# Altium footprint library CustomCase.PcbLib: 411 footprints (part 10 of 26)
Each footprint in its own frame and in the unit in brackets; x right, y up, seen from the top. Pads: shape width x height; smd on the part's side, far side on the other; paste and mask are expansions set on the pad; w line width, h text height; cw(c..) or ccw(c..) is an arc to the next point about the centre after c.
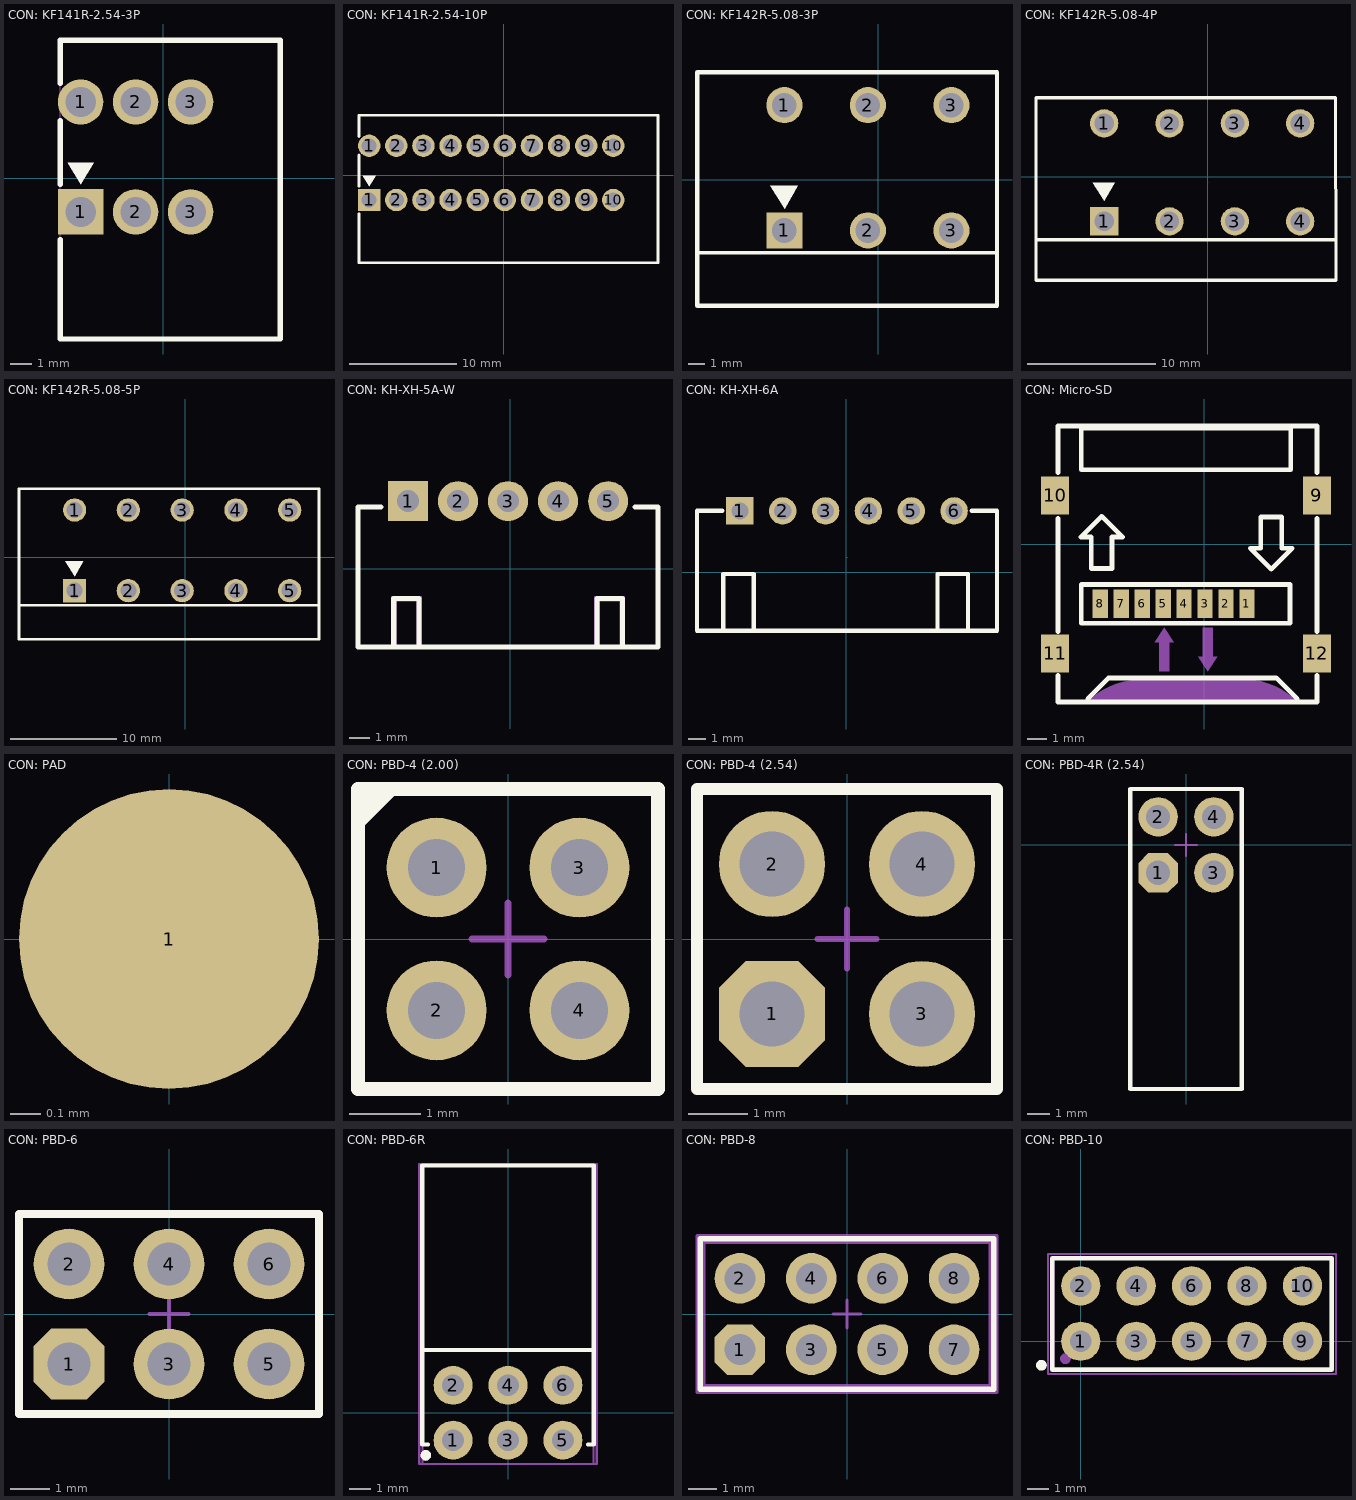
[diagram p9: the footprints below, top view; thin cyan lines are the x and y axes]

## CON: KF141R-2.54-3P [mm]
pads (6):
  rect 2.1x2.1 hole 1.4: 1(-3.816,-1.566)
  round 2.1 hole 1.4: 1(-3.816,3.514) 2(-1.276,-1.566) 2(-1.276,3.514) 3(1.264,-1.566) 3(1.264,3.514)
Top Overlay:
  region: -3.816,-0.296 -3.216,0.704 -4.416,0.704
  lines w0.254: -4.766,-2.848 -4.766,-7.436 5.394,-7.436 5.394,6.364 -4.766,6.364 -4.766,4.372 ; -4.766,-0.285 -4.766,2.655
Size Area:
  region: -3.566,3.164 -4.066,3.164 -4.066,3.864 -3.566,3.864
  region: -1.026,3.164 -1.526,3.164 -1.526,3.864 -1.026,3.864
  region: -1.026,-1.916 -1.526,-1.916 -1.526,-1.216 -1.026,-1.216
  region: -3.566,-1.216 -3.566,-1.916 -4.066,-1.916 -4.066,-1.216
  region: 1.514,-1.916 1.014,-1.916 1.014,-1.216 1.514,-1.216
  region: 1.514,3.164 1.014,3.164 1.014,3.864 1.514,3.864
  region: -4.706,6.364 -4.706,6.388 -4.741,6.424 -4.791,6.424 -4.826,6.388 -4.826,6.364 -4.826,6.339 -4.791,6.304 -4.741,6.304 -4.706,6.339
  lines w0.051: -4.766,-7.436 5.394,-7.436 5.394,6.364 -4.766,6.364 -4.766,-7.436
3D body "User Library-DG141R-3-2_54.step": height 12.66, standoff -3.44, extent -4.616,-7.096 5.444,6.504

## CON: KF141R-2.54-10P [mm]
pads (20):
  rect 2.1x2.1 hole 1.4 paste-2539.97 mask+0.051: 1(-12.589,-2.339)
  round 2.1 hole 1.4 paste-2539.97 mask+0.051: 1(-12.589,2.741) 2(-10.049,-2.339) 2(-10.049,2.741) 3(-7.509,-2.339) 3(-7.509,2.741) 4(-4.969,-2.339) 4(-4.969,2.741) 5(-2.429,-2.339) 5(-2.429,2.741) 6(0.111,-2.339) 6(0.111,2.741) 7(2.651,-2.339) 7(2.651,2.741) 8(5.191,-2.339) 8(5.191,2.741) 9(7.731,-2.339) 9(7.731,2.741) 10(10.271,-2.339) 10(10.271,2.741)
Top Overlay:
  region: -12.589,-1.069 -11.989,-0.069 -13.189,-0.069
  lines w0.254: -13.539,-3.62 -13.539,-8.209 14.461,-8.209 14.461,5.591 -13.539,5.591 -13.539,3.599 ; -13.539,-1.058 -13.539,1.883
Size Area:
  lines w0.003: 0.461,-0.861 0.461,-0.86
3D body "User Library-DG141R-5-2_54.step": height 12.66, standoff -3.44, extent -13.39,-7.85 1.75,5.75
3D body "User Library-DG141R-5-2_54.step": height 12.66, standoff -3.44, extent -0.69,-7.875 14.45,5.725

## CON: KF142R-5.08-3P [mm]
pads (6):
  rect 2.2x2.2 hole 1.5: 1(-5.711,-3.094)
  round 2.2 hole 1.5: 1(-5.711,4.526) 2(-0.631,-3.094) 2(-0.631,4.526) 3(4.449,-3.094) 3(4.449,4.526)
Top Overlay:
  region: -5.681,-1.784 -4.881,-0.384 -6.581,-0.384
  lines w0.2: -11.025,-4.45 7.225,-4.45
  lines w0.254: -11.011,-7.674 7.225,-7.674 7.225,6.526 -11.011,6.526 -11.011,-7.674
Size Area:
  lines w0.003: -0.04,-0.082 -0.039,-0.081
3D body: height 10.2, standoff 0, extent -10.975,-7.675 7.225,6.525

## CON: KF142R-5.08-4P [mm]
pads (8):
  rect 2.2x2.2 hole 1.5: 1(-8.041,-3.47)
  round 2.2 hole 1.5: 1(-8.041,4.15) 2(-2.961,-3.47) 2(-2.961,4.15) 3(2.119,-3.47) 3(2.119,4.15) 4(7.199,-3.47) 4(7.199,4.15)
Top Overlay:
  region: -8.021,-1.86 -7.221,-0.46 -8.921,-0.46
  lines w0.254: -13.325,-4.9 9.954,-4.9 ; 9.954,6.14 9.984,-8.06 ; 9.954,6.15 -13.341,6.15 -13.341,-8.05 9.984,-8.05
Size Area:
  lines w0.003: 0.17,-0.463 0.171,-0.463
3D body "DG142R-4-5.08.stp": height 13.4, standoff -3.5, extent -13.052,-8.043 9.708,6.057

## CON: KF142R-5.08-5P [mm]
pads (10):
  rect 2.2x2.2 hole 1.5: 1(-10.475,-3.165)
  round 2.2 hole 1.5: 1(-10.475,4.455) 2(-5.395,-3.165) 2(-5.395,4.455) 3(-0.315,-3.165) 3(-0.315,4.455) 4(4.765,-3.165) 4(4.765,4.455) 5(9.845,-3.165) 5(9.845,4.455)
Top Overlay:
  region: -10.445,-1.785 -9.645,-0.385 -11.345,-0.385
  lines w0.254: -15.725,-4.549 12.6,-4.549 ; -15.725,-7.745 -15.725,6.455 12.615,6.455 12.615,-7.745 -15.725,-7.745
Size Area:
  lines w0.003: 0.276,-0.153 0.277,-0.152
3D body "Terminal DG142R-5-5.08.stp": height 13.4, standoff -3.5, extent -15.475,-7.695 12.365,6.405

## CON: KH-XH-5A-W [mm]
pads (5):
  rect 2x2 hole 1.1: 1(-5.122,3.369)
  round 2 hole 1.1: 2(-2.622,3.369) 3(-0.122,3.369) 4(2.378,3.369) 5(4.878,3.369)
Top Overlay:
  lines w0.254: -7.622,-3.916 -7.622,3.084 -6.472,3.084 ; -7.621,-3.916 7.372,-3.916 ; 6.228,3.084 7.371,3.084 7.371,-3.916 ; -5.837,-3.916 -4.567,-3.916 -4.567,-1.503 -5.837,-1.503 -5.837,-3.916 ; 4.323,-3.916 5.593,-3.916 5.593,-1.503 4.323,-1.503 4.323,-3.916
Size Area:
  region: 4.196,-3.916 4.196,-1.376 5.72,-1.376 5.72,-3.916 5.466,-3.916 5.466,-1.63 4.45,-1.63 4.45,-3.916
  region: -5.964,-3.916 -5.964,-1.376 -4.44,-1.376 -4.44,-3.916 -4.694,-3.916 -4.694,-1.63 -5.71,-1.63 -5.71,-3.916
3D body "CWF-5R.step": height 5.75, standoff -3.5, extent -7.625,-3.916 7.375,3.704

## CON: KH-XH-6A [mm]
pads (6):
  rect 1.6x1.6 hole 1: 1(-6.214,3.586)
  round 1.6 hole 1: 2(-3.714,3.586) 3(-1.214,3.586) 4(1.286,3.586) 5(3.786,3.586) 6(6.286,3.586)
Top Overlay:
  lines w0.254: -7.245,3.586 -8.714,3.586 -8.714,-3.414 8.786,-3.414 8.786,3.586 7.317,3.586 ; -7.183,-3.399 -7.183,-0.097 -5.405,-0.097 -5.405,-3.399 -7.183,-3.399 ; 5.317,-3.399 5.317,-0.097 7.095,-0.097 7.095,-3.399 5.317,-3.399
Size Area:
  lines w0.003: 0.036,0.879 0.036,0.88
3D body "User Library-JST-XH-2_5mm-6.step": height 5.95, standoff -3.35, extent -8.775,-3.7 8.725,3.94

## CON: Micro-SD [mm]
pads (12):
  rect 0.8x1.5 smd paste+0 mask+0.051: 1(2.25,-3.142) 2(1.15,-3.142) 3(0.05,-3.142) 4(-1.05,-3.142) 5(-2.15,-3.142) 6(-3.25,-3.142) 7(-4.35,-3.142) 8(-5.45,-3.142)
  rect 1.45x2 smd paste+0 mask+0.051: 9(5.93,2.558) 10(-7.83,2.558) 11(-7.83,-5.742) 12(5.93,-5.742)
Top Overlay:
  lines w0.254: -7.681,-6.892 -7.681,-8.292 5.941,-8.292 ; -7.681,-4.592 -7.681,1.358 ; -7.681,3.758 -7.681,6.195 ; -7.681,6.205 5.941,6.205 5.941,3.758 ; -7.659,-8.292 5.941,-8.292 ; -6.112,-8.254 -6.112,-8.124 -5.012,-7.024 3.788,-7.024 4.888,-8.124 4.888,-8.254 ; 5.941,-6.892 5.941,-8.292 ; 5.941,-4.592 5.941,1.358 ; -6.481,0.367 -5.93,0.367 -5.93,-1.284 -4.83,-1.284 -4.83,0.367 -4.281,0.367 -4.83,0.918 -5.381,1.467 -5.93,0.918 -6.481,0.367 ; -6.45,-4.154 4.512,-4.154 4.512,-2.122 -6.45,-2.122 -6.45,-4.154 ; -6.45,3.905 4.55,3.905 4.55,6.105 -6.45,6.105 -6.45,3.905 ; 2.43,-0.22 2.978,-0.771 3.529,-1.32 4.078,-0.771 4.629,-0.22 4.078,-0.22 4.078,1.431 2.978,1.431 2.978,-0.22 2.43,-0.22
Size Area:
  region: -6.12,-8.292 -5.978,-8.151 -5.67,-7.898 -5.338,-7.676 -4.986,-7.488 -4.617,-7.335 -4.235,-7.219 -3.844,-7.141 -3.446,-7.102 -3.247,-7.102 1.914,-7.102 2.117,-7.094 2.522,-7.12 2.922,-7.187 3.314,-7.295 3.692,-7.443 4.053,-7.63 4.392,-7.852 4.707,-8.108 4.85,-8.252
  region: -2.093,-4.386 -2.601,-5.148 -2.347,-5.148 -2.347,-6.672 -1.839,-6.672 -1.839,-5.148 -1.585,-5.148
  region: 0.193,-6.672 0.701,-5.91 0.447,-5.91 0.447,-4.386 -0.061,-4.386 -0.061,-5.91 -0.315,-5.91
3D body "472192001.stp": height 1.9, standoff 0, extent -8.271,-7.107 6.329,6.193

## CON: PAD [mm]
pads (1):
  round 1 smd paste+0 mask+0: 1(0,0)

## CON: PBD-4 (2.00) [mm] "PBD-4"
height 10
pads (4):
  round 1.4 hole 0.8: 1(-1,1) 2(-1,-1) 3(1,1) 4(1,-1)
Top Overlay:
  region: -2.1,1.5 -1.5,2.1 -2.1,2.1
  lines w0.2: -2.1,-2.1 2.1,-2.1 2.1,2.1 -2.1,2.1 -2.1,-2.1
Top Assy:
  lines w0.1: -2.1,-2.1 2.1,-2.1 2.1,2.1 -2.1,2.1 -2.1,-2.1
Size Area:
  lines w0.1: -0.5,0 0.5,0 ; 0,-0.5 0,0.5 ; -2.1,-2.1 2.1,-2.1 2.1,2.1 -2.1,2.1 -2.1,-2.1
3D body "791077001-1.STEP": height 4.22, standoff -3.22, extent -2.095,-2.095 2.095,2.095

## CON: PBD-4 (2.54) [mm] "PBD-4"
height 10
pads (4):
  oct 1.8x1.8 hole 1.1: 1(-1.27,-1.27)
  round 1.8 hole 1.1: 2(-1.27,1.27) 3(1.27,-1.27) 4(1.27,1.27)
Top Overlay:
  lines w0.2: -2.54,-2.54 -2.54,2.54 2.54,2.54 2.54,-2.54 -2.54,-2.54
Top Assy:
  lines w0.1: -2.54,-2.54 -2.54,2.54 2.54,2.54 2.54,-2.54 -2.54,-2.54
Size Area:
  lines w0.1: -0.5,0 0.5,0 ; 0,-0.5 0,0.5 ; -2.54,-2.54 -2.54,2.54 2.54,2.54 2.54,-2.54 -2.54,-2.54
3D body "User Library-PBD-4R.STEP": height 8.53, standoff -0.57, extent -2.54,-2.54 2.54,2.54

## CON: PBD-4R (2.54) [mm] "PBD-4"
height 10
pads (4):
  oct 1.8x1.8 hole 1.1: 1(-1.27,-1.27)
  round 1.8 hole 1.1: 2(-1.27,1.27) 3(1.27,-1.27) 4(1.27,1.27)
Top Overlay:
  lines w0.2: -2.54,-11.1 2.54,-11.1 2.54,2.54 -2.54,2.54 -2.54,-11.1
Top Assy:
  lines w0.1: -2.54,-11.1 2.54,-11.1 2.54,2.54 -2.54,2.54 -2.54,-11.1
Size Area:
  lines w0.1: -0.5,0 0.5,0 ; 0,-0.5 0,0.5 ; -2.54,-11.1 2.54,-11.1 2.54,2.54 -2.54,2.54 -2.54,-11.1
3D body "User Library-PBD-4R.STEP": height 5.08, standoff -3.5, extent -2.54,-11.102 2.54,1.502

## CON: PBD-6 [mm] "PBD-6"
height 10
pads (6):
  oct 1.8x1.8 hole 1.1: 1(-2.54,-1.27)
  round 1.8 hole 1.1: 2(-2.54,1.27) 3(0,-1.27) 4(0,1.27) 5(2.54,-1.27) 6(2.54,1.27)
Top Overlay:
  lines w0.2: -3.81,-2.54 -3.81,2.54 3.81,2.54 3.81,-2.54 -3.81,-2.54
Top Assy:
  lines w0.1: -3.81,-2.54 -3.81,2.54 3.81,2.54 3.81,-2.54 -3.81,-2.54
Size Area:
  lines w0.1: -0.5,0 0.5,0 ; 0,-0.5 0,0.5 ; -3.81,-2.54 3.81,-2.54 3.81,2.54 -3.81,2.54 -3.81,-2.54
3D body "PBD-6.STEP": height 8.5, standoff -3, extent -3.81,-2.54 3.81,2.54

## CON: PBD-6R [mm]
pads (8):
  round 1.8 hole 1: 1(-2.54,-1.27) 2(-2.54,1.27) 3(0,-1.27) 4(0,1.27) 5(2.54,-1.27) 6(2.54,1.27)
  round 0.5 on Mech1: ""(-3.8,-1.97)
  round 0.5 on Top Overlay: ""(-3.8,-1.97)
Top Overlay:
  lines w0.2: -3.96,2.9 3.96,2.9 ; -3.7,-1.47 -3.96,-1.47 -3.96,11.43 3.96,11.43 3.96,-1.47 3.7,-1.47
Top Assy:
  lines w0.1: -3.96,-2.37 -3.96,11.43 3.96,11.43 3.96,-2.37 -3.96,-2.37
Size Area:
  lines w0.1: -4.1,-2.37 -4.1,11.5 4.1,11.5 4.1,-2.37 -4.1,-2.37
3D body "PLD-2x3.STEP": height 5.02, standoff -3.48, extent -3.96,-1.47 3.96,11.43

## CON: PBD-8 [mm] "PBD-8"
height 10
pads (8):
  oct 1.8x1.8 hole 1.1: 1(-3.81,-1.27)
  round 1.8 hole 1.1: 2(-3.81,1.27) 3(-1.27,-1.27) 4(-1.27,1.27) 5(1.27,-1.27) 6(1.27,1.27) 7(3.81,-1.27) 8(3.81,1.27)
Top Overlay:
  lines w0.2: -5.225,-2.675 -5.225,2.675 5.225,2.675 5.225,-2.675 -5.225,-2.675
Top Assy:
  lines w0.1: -5.08,-2.54 -5.08,2.54 5.08,2.54 5.08,-2.54 -5.08,-2.54
Size Area:
  lines w0.1: -0.5,0 0.5,0 ; 0,-0.5 0,0.5 ; -5.334,-2.794 5.334,-2.794 5.334,2.794 -5.334,2.794 -5.334,-2.794
3D body "PBD-8.STEP": height 8.5, standoff -3, extent -5.08,-2.54 5.08,2.54

## CON: PBD-10 [mm]
pads (12):
  round 1.8 hole 1: 1(0,0) 2(0,2.54) 3(2.54,0) 4(2.54,2.54) 5(5.08,0) 6(5.08,2.54) 7(7.62,0) 8(7.62,2.54) 9(10.16,0) 10(10.16,2.54)
  round 0.5 on Top Overlay: ""(-1.8,-1.1)
  round 0.5 on Mech1: ""(-0.7,-0.8)
Top Overlay:
  lines w0.2: -1.3,-1.3 11.5,-1.3 11.5,3.8 -1.3,3.8 -1.3,-1.3
Top Assy:
  lines w0.1: -1.25,-1.24 -1.25,3.84 11.45,3.84 11.45,-1.24 -1.25,-1.24
Size Area:
  lines w0.1: -1.5,-1.5 11.7,-1.5 11.7,4 -1.5,4 -1.5,-1.5
3D body "User Library-PBD2_54-10.STEP": height 8.4, standoff -2.7, extent -1.25,-1.24 11.45,3.84